# Altium footprint library IntegratedCircuit.PcbLib: 41 footprints (part 3 of 3)
Each footprint in its own frame and in the unit in brackets; x right, y up, seen from the top. Pads: shape width x height; smd on the part's side, far side on the other; paste and mask are expansions set on the pad; w line width, h text height; cw(c..) or ccw(c..) is an arc to the next point about the centre after c.
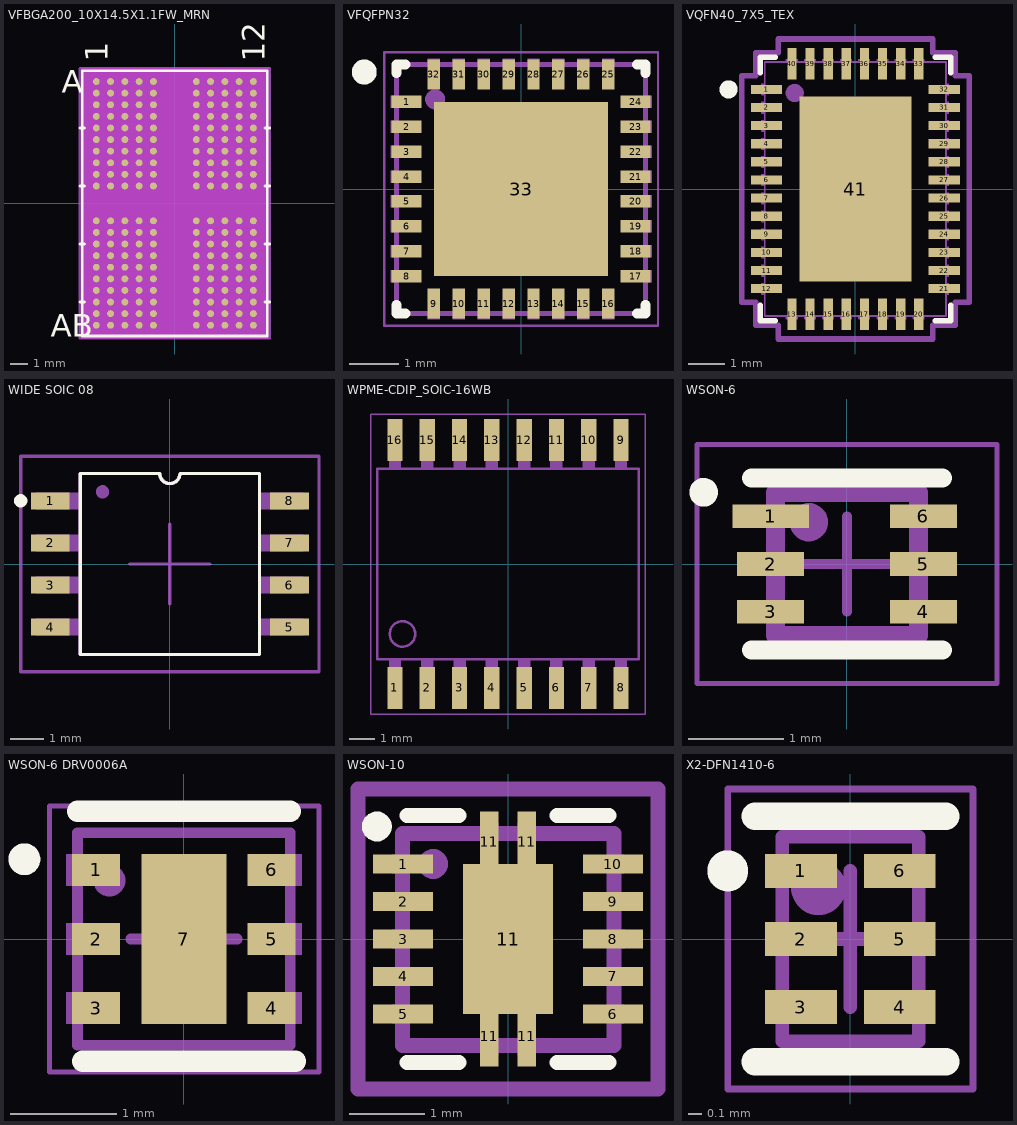
[diagram p2: the footprints below, top view; thin cyan lines are the x and y axes]

## VFBGA200_10X14.5X1.1FW_MRN [mm]
pads (200):
  round 0.386 smd paste+0 mask+0: A1(-4.4,6.825) A2(-3.6,6.825) A3(-2.8,6.825) A4(-2,6.825) A5(-1.2,6.825) A8(1.2,6.825) A9(2,6.825) A10(2.8,6.825) A11(3.6,6.825) A12(4.4,6.825) AA1(-4.4,-6.175) AA2(-3.6,-6.175) AA3(-2.8,-6.175) AA4(-2,-6.175) AA5(-1.2,-6.175) AA8(1.2,-6.175) AA9(2,-6.175) AA10(2.8,-6.175) AA11(3.6,-6.175) AA12(4.4,-6.175) AB1(-4.4,-6.825) AB2(-3.6,-6.825) AB3(-2.8,-6.825) AB4(-2,-6.825) AB5(-1.2,-6.825) AB8(1.2,-6.825) AB9(2,-6.825) AB10(2.8,-6.825) AB11(3.6,-6.825) AB12(4.4,-6.825) B1(-4.4,6.175) B2(-3.6,6.175) B3(-2.8,6.175) B4(-2,6.175) B5(-1.2,6.175) B8(1.2,6.175) B9(2,6.175) B10(2.8,6.175) B11(3.6,6.175) B12(4.4,6.175) C1(-4.4,5.525) C2(-3.6,5.525) C3(-2.8,5.525) C4(-2,5.525) C5(-1.2,5.525) C8(1.2,5.525) C9(2,5.525) C10(2.8,5.525) C11(3.6,5.525) C12(4.4,5.525) D1(-4.4,4.875) D2(-3.6,4.875) D3(-2.8,4.875) D4(-2,4.875) D5(-1.2,4.875) D8(1.2,4.875) D9(2,4.875) D10(2.8,4.875) D11(3.6,4.875) D12(4.4,4.875) E1(-4.4,4.225) E2(-3.6,4.225) E3(-2.8,4.225) E4(-2,4.225) E5(-1.2,4.225) E8(1.2,4.225) E9(2,4.225) E10(2.8,4.225) E11(3.6,4.225) E12(4.4,4.225) F1(-4.4,3.575) F2(-3.6,3.575) F3(-2.8,3.575) F4(-2,3.575) F5(-1.2,3.575) F8(1.2,3.575) F9(2,3.575) F10(2.8,3.575) F11(3.6,3.575) F12(4.4,3.575) G1(-4.4,2.925) G2(-3.6,2.925) G3(-2.8,2.925) G4(-2,2.925) G5(-1.2,2.925) G8(1.2,2.925) G9(2,2.925) G10(2.8,2.925) G11(3.6,2.925) G12(4.4,2.925) H1(-4.4,2.275) H2(-3.6,2.275) H3(-2.8,2.275) H4(-2,2.275) H5(-1.2,2.275) H8(1.2,2.275) H9(2,2.275) H10(2.8,2.275) H11(3.6,2.275) H12(4.4,2.275) J1(-4.4,1.625) J2(-3.6,1.625) J3(-2.8,1.625) J4(-2,1.625) J5(-1.2,1.625) J8(1.2,1.625) J9(2,1.625) J10(2.8,1.625) J11(3.6,1.625) J12(4.4,1.625) K1(-4.4,0.975) K2(-3.6,0.975) K3(-2.8,0.975) K4(-2,0.975) K5(-1.2,0.975) K8(1.2,0.975) K9(2,0.975) K10(2.8,0.975) K11(3.6,0.975) K12(4.4,0.975) N1(-4.4,-0.975) N2(-3.6,-0.975) N3(-2.8,-0.975) N4(-2,-0.975) N5(-1.2,-0.975) N8(1.2,-0.975) N9(2,-0.975) N10(2.8,-0.975) N11(3.6,-0.975) N12(4.4,-0.975) P1(-4.4,-1.625) P2(-3.6,-1.625) P3(-2.8,-1.625) P4(-2,-1.625) P5(-1.2,-1.625) P8(1.2,-1.625) P9(2,-1.625) P10(2.8,-1.625) P11(3.6,-1.625) P12(4.4,-1.625) R1(-4.4,-2.275) R2(-3.6,-2.275) R3(-2.8,-2.275) R4(-2,-2.275) R5(-1.2,-2.275) R8(1.2,-2.275) R9(2,-2.275) R10(2.8,-2.275) R11(3.6,-2.275) R12(4.4,-2.275) T1(-4.4,-2.925) T2(-3.6,-2.925) T3(-2.8,-2.925) T4(-2,-2.925) T5(-1.2,-2.925) T8(1.2,-2.925) T9(2,-2.925) T10(2.8,-2.925) T11(3.6,-2.925) T12(4.4,-2.925) U1(-4.4,-3.575) U2(-3.6,-3.575) U3(-2.8,-3.575) U4(-2,-3.575) U5(-1.2,-3.575) U8(1.2,-3.575) U9(2,-3.575) U10(2.8,-3.575) U11(3.6,-3.575) U12(4.4,-3.575) V1(-4.4,-4.225) V2(-3.6,-4.225) V3(-2.8,-4.225) V4(-2,-4.225) V5(-1.2,-4.225) V8(1.2,-4.225) V9(2,-4.225) V10(2.8,-4.225) V11(3.6,-4.225) V12(4.4,-4.225) W1(-4.4,-4.875) W2(-3.6,-4.875) W3(-2.8,-4.875) W4(-2,-4.875) W5(-1.2,-4.875) W8(1.2,-4.875) W9(2,-4.875) W10(2.8,-4.875) W11(3.6,-4.875) W12(4.4,-4.875) Y1(-4.4,-5.525) Y2(-3.6,-5.525) Y3(-2.8,-5.525) Y4(-2,-5.525) Y5(-1.2,-5.525) Y8(1.2,-5.525) Y9(2,-5.525) Y10(2.8,-5.525) Y11(3.6,-5.525) Y12(4.4,-5.525)
Top Overlay:
  lines w0.152: -5.309,-5.525 -5.055,-5.525 ; -5.309,-2.275 -5.055,-2.275 ; -5.309,0.975 -5.055,0.975 ; -5.309,4.225 -5.055,4.225 ; 5.055,-5.525 5.309,-5.525 ; 5.055,-2.275 5.309,-2.275 ; 5.055,0.975 5.309,0.975 ; 5.055,4.225 5.309,4.225 ; -5.182,-7.429 5.182,-7.429 5.182,7.429 -5.182,7.429 -5.182,-7.429
  text "A" at -6.325,6.19 h1.27
  text "AB" at -6.96,-7.46 h1.27
  text "1" at -3.765,7.938 h1.27
  text "12" at 5.035,7.938 h1.27
Bottom Overlay:
  text "A" at -5.69,6.19 h1.27
  text "AB" at -5.69,-7.46 h1.27
  text "1" at -5.035,7.938 h1.27
  text "12" at 3.765,7.938 h1.27
Keep-Out Layer:
  region: -5.245,-7.595 -5.245,7.595 5.245,7.595 5.245,-7.595
Top Assembly:
  lines w0.025: -5.055,6.977 -4.655,7.302 ; -5.055,-7.302 5.055,-7.302 5.055,7.302 -5.055,7.302 -5.055,-7.302
  text "A" at -6.325,6.19 h1.27
  text "AB" at -6.96,-7.46 h1.27
  text "1" at -3.765,7.938 h1.27
  text "12" at 5.035,7.938 h1.27
Mechanical 15:
  region: 5.309,-7.556 -5.309,-7.556 -5.309,7.556 5.309,7.556
  lines w0.152: -5.309,-7.556 -5.309,7.556 5.309,7.556 5.309,-7.556 -5.309,-7.556
3D body "VFBGA200_10X145X11FW_MRN.step": height 1.2, standoff 0, extent -5.055,-7.302 5.055,7.302

## VFQFPN32 [mm] "PQFN, 32-Leads, Body 5.00x5.00mm, Pitch 0.50mm, Thermal Pad 3.50x3.50mm, IPC Medium Density"
height 1
pads (65):
  rect 0.6x0.25 smd: 1(-2.3,1.75) 2(-2.3,1.25) 3(-2.3,0.75) 4(-2.3,0.25) 5(-2.3,-0.25) 6(-2.3,-0.75) 7(-2.3,-1.25) 8(-2.3,-1.75) 17(2.3,-1.75) 18(2.3,-1.25) 19(2.3,-0.75) 20(2.3,-0.25) 21(2.3,0.25) 22(2.3,0.75) 23(2.3,1.25) 24(2.3,1.75)
  rect 0.25x0.6 smd: 9(-1.75,-2.3) 10(-1.25,-2.3) 11(-0.75,-2.3) 12(-0.25,-2.3) 13(0.25,-2.3) 14(0.75,-2.3) 15(1.25,-2.3) 16(1.75,-2.3) 25(1.75,2.3) 26(1.25,2.3) 27(0.75,2.3) 28(0.25,2.3) 29(-0.25,2.3) 30(-0.75,2.3) 31(-1.25,2.3) 32(-1.75,2.3)
  rect 3.5x3.5 smd: 33(0,0)
  rect 0.15x0.25 on Mech13: ""(-2.55,-1.75) ""(-2.55,-1.25) ""(-2.55,-0.75) ""(-2.55,-0.25) ""(-2.55,0.25) ""(-2.55,0.75) ""(-2.55,1.25) ""(-2.55,1.75) ""(2.55,-1.75) ""(2.55,-1.25) ""(2.55,-0.75) ""(2.55,-0.25) ""(2.55,0.25) ""(2.55,0.75) ""(2.55,1.25) ""(2.55,1.75)
  rect 0.25x0.15 on Mech13: ""(-1.75,-2.55) ""(-1.75,2.55) ""(-1.25,-2.55) ""(-1.25,2.55) ""(-0.75,-2.55) ""(-0.75,2.55) ""(-0.25,-2.55) ""(-0.25,2.55) ""(0.25,-2.55) ""(0.25,2.55) ""(0.75,-2.55) ""(0.75,2.55) ""(1.25,-2.55) ""(1.25,2.55) ""(1.75,-2.55) ""(1.75,2.55)
Top Overlay:
  circle w0.25: c-3.15,2.35 r0.125
  lines w0.2: -2.5,-2.325 -2.5,-2.5 -2.325,-2.5 ; -2.5,2.325 -2.5,2.5 -2.325,2.5 ; 2.325,-2.5 2.5,-2.5 2.5,-2.325 ; 2.325,2.5 2.5,2.5 2.5,2.325
Top Assembly:
  circle w0.3: c-1.725,1.8 r0.05
  lines w0.1: -2.5,-2.5 -2.5,2.5 2.5,2.5 2.5,-2.5 -2.5,-2.5
  text ".Designator" at -3.749,-0.25 h0.75
Mechanical 15:
  lines w0.05: -2.75,-2.75 -2.75,2.75 2.75,2.75 2.75,-2.75 -2.75,-2.75
  lines w0.1: -0.5,0 0.5,0 ; 0,-0.5 0,0.5
3D body "PQFN50P500X500X100_HS-33N.step": height 1, standoff 0, extent -2.5,-2.5 2.5,2.5

## VQFN40_7X5_TEX [mil]
pads (41):
  rect 34x10 smd paste+0 mask+0: 1(-96.5,108.27) 2(-96.5,88.58) 3(-96.5,68.9) 4(-96.5,49.21) 5(-96.5,29.53) 6(-96.5,9.84) 7(-96.5,-9.84) 8(-96.5,-29.53) 9(-96.5,-49.21) 10(-96.5,-68.9) 11(-96.5,-88.58) 12(-96.5,-108.27) 21(96.5,-108.27) 22(96.5,-88.58) 23(96.5,-68.9) 24(96.5,-49.21) 25(96.5,-29.53) 26(96.5,-9.84) 27(96.5,9.84) 28(96.5,29.53) 29(96.5,49.21) 30(96.5,68.9) 31(96.5,88.58) 32(96.5,108.27)
  rect 10x34 smd paste+0 mask+0: 13(-68.9,-136) 14(-49.21,-136) 15(-29.53,-136) 16(-9.84,-136) 17(9.84,-136) 18(29.53,-136) 19(49.21,-136) 20(68.9,-136) 33(68.9,136) 34(49.21,136) 35(29.53,136) 36(9.84,136) 37(-9.84,136) 38(-29.53,136) 39(-49.21,136) 40(-68.9,136)
  rect 122x201 smd paste-100 mask+0: 41(0,0)
Top Overlay:
  circle w11.81: c-137.8,108.27 r3.94
  lines w6: -103.5,-126.37 -103.5,-143 -87,-143 ; -103.5,126.37 -103.5,143 -87,143 ; 87,-143 103.5,-143 103.5,-126.37 ; 87,143 103.5,143 103.5,126.37
Top Paste:
  region: -3.94,96.56 -57.06,96.56 -57.06,54.19 -3.94,54.19
  region: -3.94,46.31 -57.06,46.31 -57.06,3.94 -3.94,3.94
  region: -3.94,-3.94 -57.06,-3.94 -57.06,-46.31 -3.94,-46.31
  region: -3.94,-54.19 -57.06,-54.19 -57.06,-96.56 -3.94,-96.56
  region: 57.06,96.56 3.94,96.56 3.94,54.19 57.06,54.19
  region: 57.06,46.31 3.94,46.31 3.94,3.94 57.06,3.94
  region: 57.06,-3.94 3.94,-3.94 3.94,-46.31 57.06,-46.31
  region: 57.06,-54.19 3.94,-54.19 3.94,-96.56 57.06,-96.56
Top Assembly:
  drawing of 205 lines, arcs and shapes, not listed
  text ".Designator" at 5.25,-78.71 h15.75
Mechanical 15:
  lines w6: -123.5,-123.27 -108.5,-123.27 -108.5,-148 -83.9,-148 -83.9,-163 83.9,-163 83.9,-148 108.5,-148 108.5,-123.27 123.5,-123.27 123.5,123.27 108.5,123.27 108.5,148 83.9,148 83.9,163 -83.9,163 -83.9,148 -108.5,148 -108.5,123.27 -123.5,123.27 -123.5,-123.27
3D body "VQFN40_7X5_TEX.step": height 39.09, standoff 0, extent -101.5,-140.98 101.5,140.98

## WIDE SOIC 08 [mil]
pads (8):
  rect 46x20 smd paste+0 mask+0: 1(-142,75) 2(-142,25) 3(-142,-25) 4(-142,-75) 5(142,-75) 6(142,-25) 7(142,25) 8(142,75)
Top Overlay:
  circle w11.81: c-177.17,75.02 r1.97
  lines w1: -106.5,-85 -106.5,-65 ; -106.5,-35 -106.5,-15 ; -106.5,15 -106.5,35 ; -106.5,65 -106.5,85 ; 106.5,-85 106.5,-65 ; 106.5,-35 106.5,-15 ; 106.5,15 106.5,35 ; 106.5,65 106.5,85
  lines w3.94: -106.5,-107.5 -106.5,107.5 -12,107.5 ccw(c0,107.5) 12,107.5 106.5,107.5 106.5,-107.5 -106.5,-107.5
Top Assembly:
  circle w11.81: c-79.95,85.72 r1.97
  rectangle: 106.5,-35 159,-15
  rectangle: 106.5,-85 159,-65
  rectangle: -159,-85 -106.5,-65
  rectangle: -159,-35 -106.5,-15
  rectangle: -159,15 -106.5,35
  rectangle: 106.5,65 159,85
  rectangle: -159,65 -106.5,85
  rectangle: 106.5,15 159,35
  lines w1: -106.5,-85 -106.5,-65 ; -106.5,-35 -106.5,-15 ; -106.5,15 -106.5,35 ; -106.5,65 -106.5,85 ; 106.5,-85 106.5,-65 ; 106.5,-35 106.5,-15 ; 106.5,15 106.5,35 ; 106.5,65 106.5,85
  lines w3.94: -106.5,-107.5 -106.5,107.5 -12,107.5 ccw(c0,107.5) 12,107.5 106.5,107.5 106.5,-107.5 -106.5,-107.5
  text ".Designator" at 7.03,-100.89 h19.68
Mechanical 15:
  lines w3.94: -47.54,0 0,0 ; 0,-47.54 0,0 ; 0,47.54 0,0 ; 47.54,0 0,0 ; -177.17,-127.95 -177.17,127.95 177.17,127.95 177.17,-127.95 -177.17,-127.95
3D body "21-0262_W8MS+1_ADI.step": height 84.09, standoff 0, extent -159.02,-107.48 159.02,107.48

## WPME-CDIP_SOIC-16WB [mm]
height 1
pads (16):
  rect 0.6x1.65 smd: 1(-4.445,-4.875) 2(-3.175,-4.875) 3(-1.905,-4.875) 4(-0.635,-4.875) 5(0.635,-4.875) 6(1.905,-4.875) 7(3.175,-4.875) 8(4.445,-4.875) 9(4.445,4.875) 10(3.175,4.875) 11(1.905,4.875) 12(0.635,4.875) 13(-0.635,4.875) 14(-1.905,4.875) 15(-3.175,4.875) 16(-4.445,4.875)
Top Courtyard:
  lines w0.05: -5.4,-5.9 5.4,-5.9 5.4,5.9 -5.4,5.9 -5.4,-5.9
Top Designator:
  text ".Designator" at -4.998,-0.333 h1
Top Assembly:
  circle w0.1: c-4.15,-2.75 r0.5
  rectangle: 4.25,3.75 4.64,5.15
  rectangle: 2.98,3.75 3.37,5.15
  rectangle: 1.71,3.75 2.1,5.15
  rectangle: 0.44,3.75 0.83,5.15
  rectangle: -0.83,3.75 -0.44,5.15
  rectangle: -2.1,3.75 -1.71,5.15
  rectangle: -3.37,3.75 -2.98,5.15
  rectangle: -4.64,3.75 -4.25,5.15
  rectangle: 4.25,-5.15 4.64,-3.75
  rectangle: 2.98,-5.15 3.37,-3.75
  rectangle: 1.71,-5.15 2.1,-3.75
  rectangle: 0.44,-5.15 0.83,-3.75
  rectangle: -0.83,-5.15 -0.44,-3.75
  rectangle: -2.1,-5.15 -1.71,-3.75
  rectangle: -3.37,-5.15 -2.98,-3.75
  rectangle: -4.64,-5.15 -4.25,-3.75
  lines w0.1: -4.64,-3.75 -4.64,-5.15 -4.25,-5.15 -4.25,-3.75 ; -4.64,3.75 -4.64,5.15 -4.25,5.15 -4.25,3.75 ; -3.37,-3.75 -3.37,-5.15 -2.98,-5.15 -2.98,-3.75 ; -3.37,3.75 -3.37,5.15 -2.98,5.15 -2.98,3.75 ; -2.1,-3.75 -2.1,-5.15 -1.71,-5.15 -1.71,-3.75 ; -2.1,3.75 -2.1,5.15 -1.71,5.15 -1.71,3.75 ; -0.83,-3.75 -0.83,-5.15 -0.44,-5.15 -0.44,-3.75 ; -0.83,3.75 -0.83,5.15 -0.44,5.15 -0.44,3.75 ; 0.44,-3.75 0.44,-5.15 0.83,-5.15 0.83,-3.75 ; 0.44,3.75 0.44,5.15 0.83,5.15 0.83,3.75 ; 1.71,-3.75 1.71,-5.15 2.1,-5.15 2.1,-3.75 ; 1.71,3.75 1.71,5.15 2.1,5.15 2.1,3.75 ; 2.98,-3.75 2.98,-5.15 3.37,-5.15 3.37,-3.75 ; 2.98,3.75 2.98,5.15 3.37,5.15 3.37,3.75 ; 4.25,-3.75 4.25,-5.15 4.64,-5.15 4.64,-3.75 ; 4.25,3.75 4.25,5.15 4.64,5.15 4.64,3.75 ; -5.15,-3.75 -5.15,3.75 5.15,3.75 5.15,-3.75 -5.15,-3.75
  text ".Designator" at -4.998,-0.333 h1
3D body "18024x15401x.stp": height 2.5, standoff 0, extent -5.15,-5.15 5.15,5.15

## WSON-6 [mm] "SON, 6-Leads, Body 1.98x1.98mm, Pitch 0.65mm, Thermal Pad 1.60x0.91mm, IPC Medium Density"
height 0.6
pads (6):
  rect 0.8x0.25 smd: 1(-0.8,0.5)
  rect 0.7x0.25 smd: 2(-0.8,0) 3(-0.8,-0.5) 4(0.8,-0.5) 5(0.8,0) 6(0.8,0.5)
Top Overlay:
  circle w0.2: c-1.5,0.75 r0.05
  lines w0.2: -1,-0.9 1,-0.9 ; -1,0.9 1,0.9
Top Assembly:
  circle w0.3: c-0.4,0.437 r0.05
  lines w0.2: -0.75,-0.75 0.75,-0.75 0.75,0.75 -0.75,0.75 -0.75,-0.75
  text ".Designator" at -1.25,-0.083 h0.25
Mechanical 15:
  lines w0.05: -1.57,-1.25 -1.57,1.25 1.57,1.25 1.57,-1.25 -1.57,-1.25
  lines w0.1: -0.5,0 0.5,0 ; 0,-0.5 0,0.5
3D body "User Library-WSON6.step": height 0.81, standoff 0.01, extent -0.775,-0.75 0.775,0.75

## WSON-6 DRV0006A [mm] "SON, 6-Leads, Body 1.98x1.98mm, Pitch 0.65mm, Thermal Pad 1.60x0.91mm, IPC Medium Density"
height 0.6
pads (7):
  rect 0.45x0.3 smd paste-2539.97 mask+0.05: 1(-0.825,0.65) 2(-0.825,0) 3(-0.825,-0.65) 4(0.825,-0.65) 5(0.825,0) 6(0.825,0.65)
  rect 0.8x1.6 smd paste-2539.97 mask+0.05: 7(0,0)
Top Overlay:
  circle w0.2: c-1.5,0.75 r0.05
  lines w0.2: -1,1.2 1,1.2 ; -0.95,-1.15 1.05,-1.15
Top Paste:
  region: -0.4,0.8 -0.4,0.1 0.4,0.1 0.4,0.8
  region: 0.4,-0.8 0.4,-0.1 -0.4,-0.1 -0.4,-0.8
  region: -1.05,0.5 -1.05,0.8 -0.6,0.8 -0.6,0.5
  region: -1.05,-0.15 -1.05,0.15 -0.6,0.15 -0.6,-0.15
  region: -1.05,-0.8 -1.05,-0.5 -0.6,-0.5 -0.6,-0.8
  region: 0.6,-0.8 0.6,-0.5 1.05,-0.5 1.05,-0.8
  region: 0.6,0.5 0.6,0.8 1.05,0.8 1.05,0.5
  region: 0.6,-0.15 0.6,0.15 1.05,0.15 1.05,-0.15
Top Assembly:
  circle w0.2: c-0.7,0.55 r0.05
  region: -1.016,0.8 -1.109,0.8 -1.109,0.5 -1.016,0.5
  region: -1.016,-0.5 -1.109,-0.5 -1.109,-0.8 -1.016,-0.8
  region: -1.016,0.15 -1.109,0.15 -1.109,-0.15 -1.016,-0.15
  rectangle: 1.016,0.5 1.109,0.8
  rectangle: 1.016,-0.15 1.109,0.15
  rectangle: 1.016,-0.8 1.109,-0.5
  lines w0.1: -1,-1 -1,1 1,1 1,-1 -1,-1
  text ".Designator" at -1.25,-0.083 h0.25
Mechanical 15:
  lines w0.05: -1.264,-1.25 1.27,-1.25 1.27,1.25 -1.264,1.25 -1.264,-1.25
  lines w0.1: -0.5,0 0.5,0 ; 0,-0.5 0,0.5
3D body "WSON-6_DRV0006A.step": height 0.76, standoff -0.04, extent -1.01,-1.01 1.01,1.01

## WSON-10 [mm]
pads (15):
  rect 0.8x0.25 smd mask+0.07: 1(-1.4,1) 2(-1.4,0.5) 3(-1.4,0) 4(-1.4,-0.5) 5(-1.4,-1) 6(1.4,-1) 7(1.4,-0.5) 8(1.4,0) 9(1.4,0.5) 10(1.4,1)
  rect 0.25x0.8 smd mask+0.07: 11(-0.25,-1.3) 11(-0.25,1.3) 11(0.25,-1.3) 11(0.25,1.3)
  rect 1.2x2 smd mask+0.07: 11(0,0)
Top Overlay:
  circle w0.2: c-1.75,1.5 r0.1
  lines w0.2: -1.35,-1.65 -0.65,-1.65 ; -1.35,1.65 -0.65,1.65 ; 0.65,-1.65 1.35,-1.65 ; 0.65,1.65 1.35,1.65
Top Assembly:
  circle w0.2: c-1,1 r0.1
  region: 0.376,-1.337 0.125,-1.337 0.125,-1.551 0.376,-1.551
  region: -0.124,-1.331 -0.375,-1.331 -0.375,-1.551 -0.124,-1.551
  rectangle: 0.124,1.3 0.375,1.551
  rectangle: -0.376,1.3 -0.125,1.551
  rectangle: -1.548,0.873 -1.4,1.125
  rectangle: -1.548,0.373 -1.4,0.625
  rectangle: -1.548,-0.127 -1.4,0.125
  rectangle: -1.548,-0.627 -1.4,-0.375
  rectangle: -1.548,-1.127 -1.4,-0.875
  region: 1.548,-0.873 1.4,-0.873 1.4,-1.125 1.548,-1.125
  region: 1.548,-0.373 1.4,-0.373 1.4,-0.625 1.548,-0.625
  region: 1.56,0.124 1.412,0.124 1.412,-0.127 1.56,-0.127
  region: 1.548,0.627 1.4,0.627 1.4,0.375 1.548,0.375
  region: 1.548,1.127 1.4,1.127 1.4,0.875 1.548,0.875
  lines w0.2: -1.407,-1.417 1.412,-1.417 1.412,1.404 -1.407,1.404 -1.407,-1.417
Mechanical 15:
  lines w0.2: -0.5,0 0.5,0 ; 0,-0.5 0,0.5 ; -2,-2 -2,2 2,2 2,-2 -2,-2
3D body "WSON-10.STEP": height 0.81, standoff 0.01, extent -1.55,-1.55 1.55,1.55

## X2-DFN1410-6 [mm] "SON, 6-Leads, Body 1.98x1.98mm, Pitch 0.65mm, Thermal Pad 1.60x0.91mm, IPC Medium Density"
height 0.6
pads (6):
  rect 0.525x0.25 smd: 1(-0.363,0.5) 2(-0.363,0) 3(-0.363,-0.5) 4(0.363,-0.5) 5(0.363,0) 6(0.363,0.5)
Top Overlay:
  circle w0.2: c-0.9,0.5 r0.05
  lines w0.2: -0.7,-0.9 0.7,-0.9 ; -0.7,0.9 0.7,0.9
Top Assembly:
  circle w0.3: c-0.234,0.375 r0.05
  region: 0.567,0.625 0.481,0.625 0.481,0.375 0.567,0.375
  region: 0.567,0.125 0.481,0.125 0.481,-0.125 0.567,-0.125
  region: 0.567,-0.375 0.481,-0.375 0.481,-0.625 0.567,-0.625
  rectangle: -0.567,-0.625 -0.481,-0.375
  rectangle: -0.567,-0.125 -0.481,0.125
  rectangle: -0.567,0.375 -0.481,0.625
  lines w0.1: -0.5,-0.75 -0.5,0.75 0.5,0.75 0.5,-0.75 -0.5,-0.75
  text ".Designator" at 0.2,-1.5 h0.3
Mechanical 15:
  lines w0.05: -0.9,-1.1 -0.9,1.1 0.9,1.1 0.9,-1.1 -0.9,-1.1
  lines w0.1: -0.5,0 0.5,0 ; 0,-0.5 0,0.5
3D body "DFN1410H4-6 v1.step": height 0.39, standoff 0, extent -0.5,-0.7 0.5,0.7